# Altium footprint library Connector-Audio-Video.PcbLib: 24 footprints (part 2 of 2)
Each footprint in its own frame and in the unit in brackets; x right, y up, seen from the top. Pads: shape width x height; smd on the part's side, far side on the other; paste and mask are expansions set on the pad; w line width, h text height; cw(c..) or ccw(c..) is an arc to the next point about the centre after c.
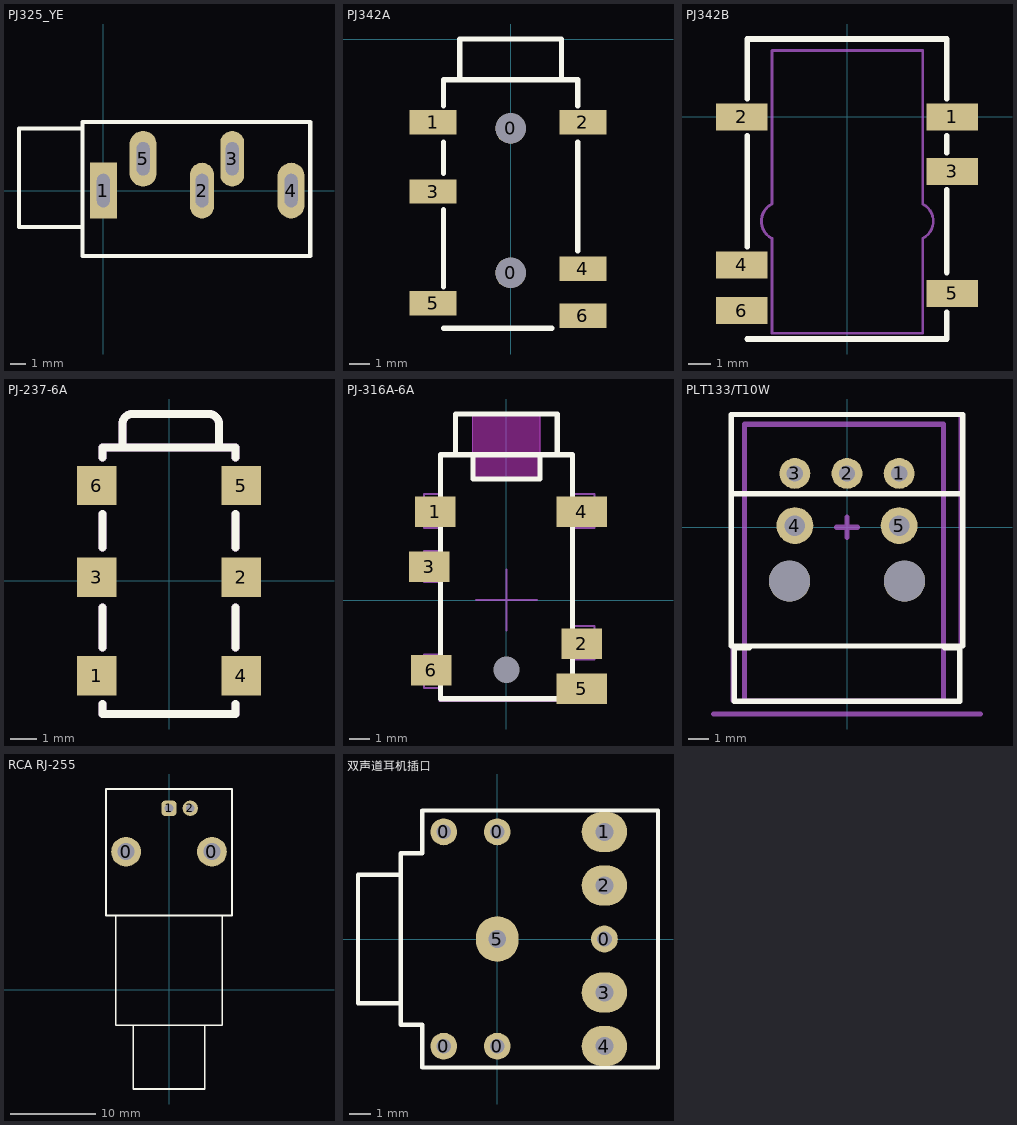
[diagram p1: the footprints below, top view; thin cyan lines are the x and y axes]

## PJ325_YE [mm] "黄色，18*8.1*12.3mm"
pads (5):
  rect 1.7x3.5 hole 0.8 slot 2.1 at 90 deg: 1(0,0)
  oval 1.5x3.5 hole 0.8 slot 2.1 at 90 deg: 2(6.2,0) 3(8.1,2)
  oval 1.7x3.5 hole 0.8 slot 2.1 at 90 deg: 4(11.8,0) 5(2.5,2)
Top Overlay:
  lines w0.254: -1.3,-2.3 -5.3,-2.3 -5.3,3.9 -1.3,3.9 ; -1.3,-4.1 -1.3,4.3 13,4.3 13,-4.1 -1.3,-4.1
3D body "PJ325_YE-.STEP": height 12.35, standoff -2.9, extent -5.205,-3.937 12.825,4.163

## PJ342A [mm] "有头"
pads (8):
  round 1.5 hole 1.5: 0(0,-11.5) 0(0,-4.4)
  rect 2.3x1.2 smd: 1(-3.81,-4.1) 2(3.556,-4.1) 3(-3.81,-7.5) 4(3.556,-11.3) 5(-3.81,-13) 6(3.556,-13.6)
Top Overlay:
  lines w0.254: -3.302,-14.224 2.032,-14.224 ; -3.302,-12.192 -3.302,-8.382 ; -3.302,-6.604 -3.302,-5.08 ; -3.302,-3.302 -3.302,-2 3.302,-2 3.302,-3.302 ; -2.5,-2 -2.5,0 2.5,0 2.5,-2 ; 3.302,-10.414 3.302,-5.08
3D body "PJ342A-.STEP": height 4.7, standoff -0.6, extent -4.191,-14.162 4.109,-0.062

## PJ342B [mm] "沉板式，无头"
pads (6):
  rect 2.3x1.2 smd: 1(4.699,0) 2(-4.699,0) 3(4.699,-2.43) 4(-4.699,-6.604) 5(4.699,-7.874) 6(-4.699,-8.636)
Top Overlay:
  lines w0.254: -4.445,-9.906 4.445,-9.906 4.445,-9.476 4.445,-8.714 ; -4.445,-5.793 -4.445,-0.84 ; -4.445,0.811 -4.445,3.478 4.445,3.478 4.445,0.811 ; 4.445,-6.936 4.445,-3.253 ; 4.445,-1.602 4.445,-0.84
Board Outline:
  lines w0.127: -3.353,-9.652 3.378,-9.652 3.378,-5.412 ccw(c2.997,-4.65) 3.378,-3.888 3.378,2.97 -3.353,2.97 -3.353,-3.888 ccw(c-2.972,-4.65) -3.353,-5.412 -3.353,-9.652
3D body "PJ342B-.STEP": height 1.25, standoff -2.75, extent -4.572,-9.285 4.928,3.697

## PJ-237-6A [mm]
pads (6):
  rect 1.5x1.5 smd: 1(-2.75,-3.625) 2(2.75,0.125) 3(-2.75,0.125) 4(2.75,-3.625) 5(2.75,3.625) 6(-2.75,3.625)
Top Overlay:
  lines w0.3: -2.54,-4.699 -2.54,-5.08 2.54,-5.08 2.54,-4.699 ; -2.54,-2.54 -2.54,-1.016 ; -2.54,1.27 -2.54,2.54 ; -2.54,4.699 -2.54,5.08 2.54,5.08 2.54,4.699 ; -1.778,5.08 -1.778,5.969 cw(c-1.397,5.969) -1.397,6.35 1.524,6.35 cw(c1.524,5.969) 1.905,5.969 1.905,5.207 ; 2.54,-2.54 2.54,-1.016 ; 2.54,1.27 2.54,2.54 ; 1.905,5.207 cw(c1.778,5.207) 1.778,5.08 ccw(c1.778,5.207) 1.905,5.207
Mechanical 29:
  lines w0.3: -2.54,-4.699 -2.54,-5.08 2.54,-5.08 2.54,-4.699 ; -2.54,-2.54 -2.54,-1.016 ; -2.54,1.27 -2.54,2.54 ; -2.54,4.699 -2.54,5.08 2.54,5.08 2.54,4.699 ; -1.778,5.08 -1.778,5.969 cw(c-1.397,5.969) -1.397,6.35 1.524,6.35 cw(c1.524,5.969) 1.905,5.969 1.905,5.207 ; 2.54,-2.54 2.54,-1.016 ; 2.54,1.27 2.54,2.54 ; 1.905,5.207 cw(c1.778,5.207) 1.778,5.08 ccw(c1.778,5.207) 1.905,5.207
  text "'.Designator'" at -0.635,4.318 h2
3D body "2.5mm audio jack.STEP": height 4.06, standoff -0.01, extent -3.651,-5.223 3.683,6.747

## PJ-316A-6A [mm]
pads (7):
  rect 2x1.5 smd: 1(-3.5,4.35) 2(3.7,-2.15) 3(-3.8,1.65) 6(-3.7,-3.45)
  rect 2.5x1.5 smd: 4(3.7,4.35) 5(3.7,-4.35)
  round 1.1 hole 1.3 unplated: ""(0,-3.429)
Top Overlay:
  lines w0.254: -2.5,7.15 -2.499,8.356 -2.5,9.15 2.5,9.15 2.5,7.15 ; -1.65,7.15 -1.65,5.95 1.65,5.95 1.65,7.15 ; -3.25,-4.85 -3.25,7.15 3.25,7.15 3.25,-4.85 -3.25,-4.85
Keep-Out Layer:
  board cut-out: -1.651,5.969 1.651,5.969 1.651,9.098 -1.651,9.098
  board cut-out: -1.651,5.969 1.651,5.969 1.651,7.239 -1.651,7.239
Board Outline:
  lines w0.05: -1.651,5.969 1.651,5.969 1.651,9.098 -1.651,9.098 -1.651,5.969
  text "CNC" at 0.762,6.223 h2.03
Top Component Outline:
  lines w0.1: -4.064,-4.318 -4.064,-2.667 -3.25,-2.667 -3.25,0.889 -4.064,0.889 -4.064,2.413 -3.302,2.413 -3.302,3.556 -4.064,3.556 -4.064,5.207 -3.937,5.207 -3.302,5.207 -3.302,7.112 -2.54,7.112 -2.5,7.112 -2.5,9.144 2.5,9.144 2.5,7.15 3.25,7.15 3.25,5.207 3.302,5.207 4.318,5.207 4.318,3.556 3.302,3.556 3.302,-1.27 4.318,-1.27 4.318,-2.921 3.25,-2.921 3.302,-2.921 3.302,-3.683 4.318,-3.683 4.318,-4.953 -3.302,-4.953 -3.302,-4.318 -4.064,-4.318
Top Component Center:
  lines w0.1: -1.5,0 1.5,0 ; 0,-1.5 0,1.5
Top Value:
  text "'.Comment'" at -3.297,-0.455 h1.52
Top Designator:
  text "'.Designator'" at -4.367,-0.593 h1.52
3D body "PJ-316A.stp": height 4.4, standoff -0.6, extent -4.048,-4.902 4.252,9.098

## PLT133/T10W [mm]
pads (7):
  round 1.5 hole 0.8: 1(2.54,2.625) 2(0,2.625) 3(-2.54,2.625)
  round 1.8 hole 1: 4(-2.54,0.085) 5(2.54,0.085)
  round 2 hole 2 unplated: ""(-2.8,-2.625) ""(2.8,-2.625)
Top Overlay:
  lines w0.254: -4.75,-5.884 -5.5,-5.884 -5.5,-8.475 5.5,-8.475 5.5,-5.884 4.75,-5.884 ; -5.639,1.635 5.639,1.635 ; -5.639,1.635 -5.639,5.495 5.639,5.495 5.639,1.635 ; -5.639,1.635 -5.639,-5.782 5.639,-5.782 5.639,1.635
Top Component Outline:
  lines w0.254: -6.5,-9.1 6.5,-9.1 ; -5,-8.475 -5,5.025 4.7,5.025 4.7,-8.475 -5,-8.475
Top Component Center:
  lines w0.254: -0.5,0 0.5,0 ; 0,-0.5 0,0.5
Top Value:
  text "'.Comment'" at -5.6,-0.481 h2.54
Top Designator:
  text "'.Designator'" at -7.1,-0.256 h2.54
Bottom Courtyard:
  lines w0.152: -5.6,-8.475 -5.6,5.525 5.5,5.525 5.5,-8.375 5.4,-8.475 -5.6,-8.475
3D body "T015-2.step": height 9.6, standoff -3.55, extent -4.951,-8.62 4.699,4.98

## RCA RJ-255 [mm] "RCA莲花头AV接口座"
pads (4):
  round 3.5 hole 2: 0(-5.05,16.212) 0(5.05,16.212)
  rrect50% 1.8x1.8 hole 1: 1(0,21.312)
  round 1.8 hole 1: 2(2.5,21.312)
Top Overlay:
  lines w0.203: -6.25,8.7 -6.25,-4.2 6.25,-4.2 6.25,8.7 ; -4.2,-4.2 -4.2,-8.4 -4.2,-11.684 4.2,-11.684 4.2,-4.2 ; -7.417,8.7 7.417,8.7 7.417,23.584 -7.417,23.584 -7.417,8.7
3D body "RCA RJ-255-.STEP": height 13.95, standoff -5.35, extent -7.366,-11.708 7.334,23.392

## 双声道耳机插口 [mm]
height 5
pads (10):
  round 1.27 hole 0.7: 0(-2.54,-5.08) 0(-2.54,5.08) 0(0,-5.08) 0(0,5.08) 0(5.08,0)
  oval 2.159x1.905 hole 0.85: 1(5.08,5.08) 2(5.08,2.54) 3(5.08,-2.54) 4(5.08,-5.08)
  oval 2.032x2.159 hole 0.85: 5(0,0)
Top Overlay:
  lines w0.203: -4.572,-3.048 -6.604,-3.048 -6.604,3.048 -4.572,3.048 ; -4.572,-4.064 -3.556,-4.064 -3.556,-6.096 7.62,-6.096 7.62,6.096 -3.556,6.096 -3.556,4.064 -4.572,4.064 -4.572,-4.064
3D body: height 2.24, standoff -0.76, extent -0.5,-0.496 0.498,0.5
3D body: height 2.24, standoff -0.76, extent 4.58,-5.576 5.578,-4.58
3D body: height 2.24, standoff -0.76, extent 4.58,-3.036 5.578,-2.04
3D body: height 2.24, standoff -0.76, extent 4.58,2.084 5.578,3.08
3D body: height 2.24, standoff -0.76, extent 4.58,4.584 5.578,5.58
3D body: height 2.24, standoff -0.76, extent 4.775,-0.299 5.374,0.299
3D body: height 2.24, standoff -0.76, extent -0.305,-5.379 0.294,-4.781
3D body: height 2.24, standoff -0.76, extent -2.845,-5.379 -2.246,-4.781
3D body: height 2.24, standoff -0.76, extent -2.845,4.781 -2.246,5.379
3D body: height 2.24, standoff -0.76, extent -0.305,4.781 0.294,5.379
3D body: height 4.8, standoff 1.2, extent -6.604,-1.808 -5.604,1.778
3D body: height 5.99, standoff 0.01, extent -6.588,-2.988 -5.588,2.988
3D body: height 5.99, standoff 0.01, extent -5.572,-2.988 -4.572,2.988
3D body: height 5, standoff 0.03, extent -4.572,-4.064 -3.556,4.064
3D body: height 5, standoff 0.03, extent -3.556,-6.096 7.62,6.096